# Altium schematic symbol library TitansLib.SchLib: 462 symbols (part 3 of 24)
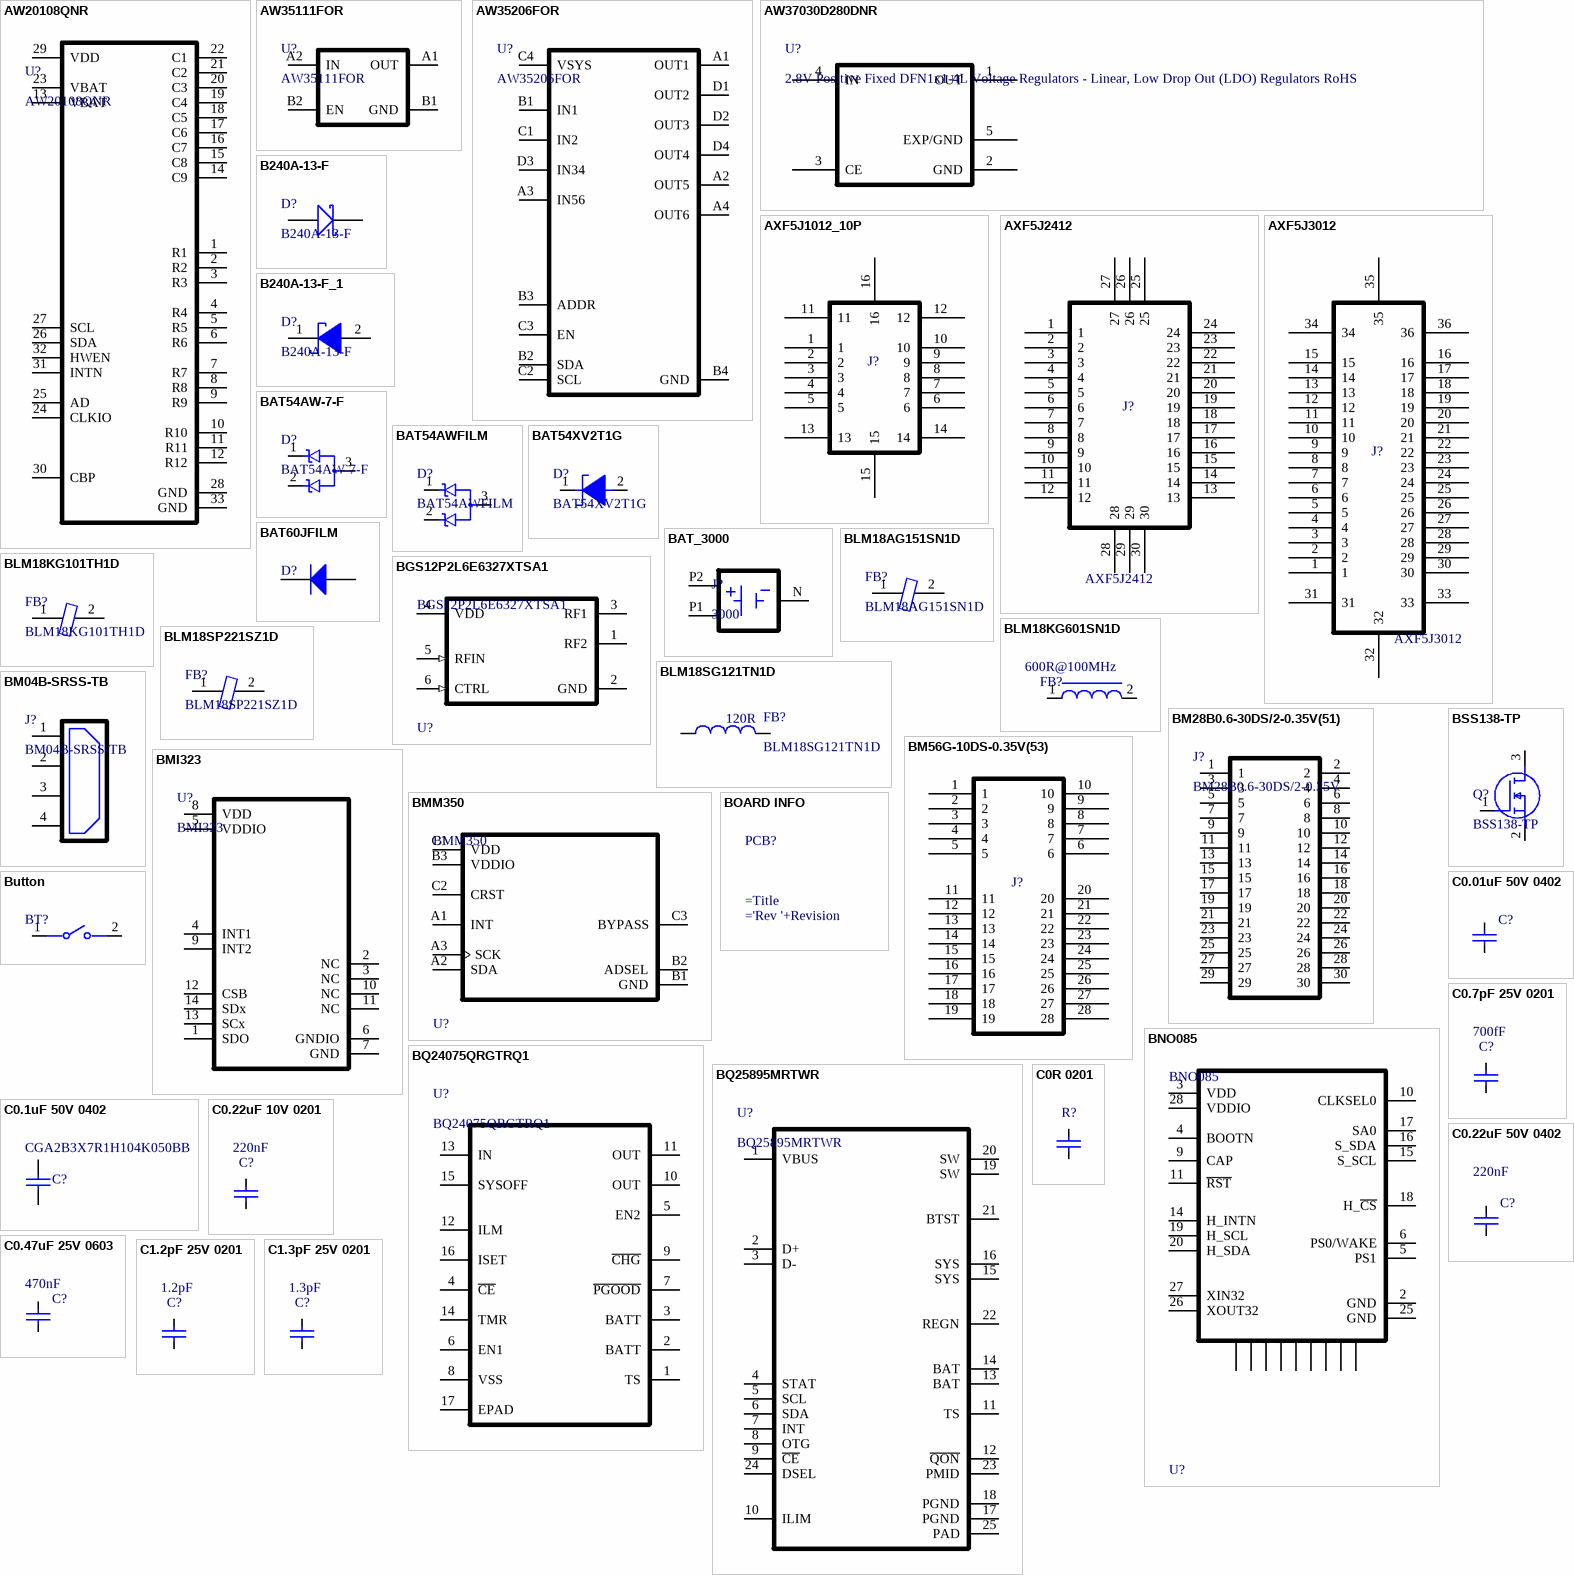
[diagram p19: symbols AW20108QNR to C1.3pF 25V 0201]

## BLM18KG101TH1D
designator FB?
100 Ohms @ 100 MHz Ferrite Bead 0805 3A RDC=0.03; Manufacturer 1: Murata; Suplier Unit Price 1: 0.1; Datashee: https://br.mouser.com/datasheet/3/76/2/QNFA9101.pdf; Manufacturer Part Number 1: BLM18KG101TH1D; Supplier Part Number 1: 81-BLM18KG101TH1D; Supplier Link 1: https://br.mouser.com/ProductDetail/Murata-Electronics/BLM18KG101TH1D?qs=DXqDLUyyb5Xf26t7%252Bt4UuQ%3D%3D; Supplier 1: Mouser
footprint BEADC1608X75N
pins: 1, 2

## BLM18KG601SN1D
designator FB?  Output Impedance: 600R@100MHz  (hidden comment: BLM18KG601SN1D)
Ferrite Chip, 1 Function(s), 1A, 2 Pin(s); Manufacturer: Murata; DC Resistance-Max: 150mR; Clock Frequency: 100MHz; Channels: 1; Current Rating: 1.3A; Supplier: Mouser; Supplier Part Number: 81-BLM18KG601SN1D; Manufacturer Part Number: BLM18KG601SN1D; RoHS: Yes; Category: Ferrite Beads and Chips; Stock: 469571; Pricing: 1=0.1, 10=0.062, 50=0.048, 100=0.043, 1000=0.027, 10000=0.019 (USD); Mounting Technology: Surface Mount; Material: Ferrite; Case Code: 0603; Terminal Finish: Tin; Min Operating Temperature: -55°C; Max Operating Temperature: 125°C; JESD-609 Code: e3; Construction: Chip Bead; Filter Type: FERRITE CHIP; Min Frequency: 100MHz; Packaging: Tape and Reel; Length: 1.6mm; Width: 0.8mm; Height: 0.8mm; Reach SVHC Compliant: Yes; RoHS Compliant: Yes; ComponentLink1URL: https://datasheet.ciiva.com:443/pdfs/VipMasterIC/IC/MURE/MURE-S-A0008515752/MURE-S-A0008515752-1.pdf?src-supplier=IHS+Markit; ComponentLink1Description: https://datasheet.ciiva.com:443/pdfs/VipMasterIC/IC/MURE/MURE-S-A0008515752/MURE-S-A0008515752-1.pdf?src-supplier=IHS+Markit; ComponentLink2URL: https://datasheet.ciiva.com/11795/0900766b81076276-11795743.pdf?src-supplier=Rs; ComponentLink2Description: https://datasheet.ciiva.com/11795/0900766b81076276-11795743.pdf?src-supplier=Rs; ComponentLink3URL: https://datasheet.ciiva.com/18183/getdatasheetpartid-226848-18183204.pdf?src-supplier=Verical; ComponentLink3Description: https://datasheet.ciiva.com/18183/getdatasheetpartid-226848-18183204.pdf?src-supplier=Verical; ComponentLink4URL: https://datasheet.ciiva.com/22715/486545-22715706.pdf?src-supplier=Element14; ComponentLink4Description: https://datasheet.ciiva.com/22715/486545-22715706.pdf?src-supplier=Element14; ComponentLink5URL: https://datasheet.ciiva.com/1012/l0110e-1012299.pdf?src-supplier=Digikey; ComponentLink5Description: https://datasheet.ciiva.com/1012/l0110e-1012299.pdf?src-supplier=Digikey; ComponentLink6URL: https://datasheet.ciiva.com/1012/l0110e-1012300.pdf?src-supplier=Digikey; ComponentLink6Description: https://datasheet.ciiva.com/1012/l0110e-1012300.pdf?src-supplier=Digikey; ComponentLink7URL: https://datasheet.ciiva.com/1012/l0110e-1012301.pdf?src-supplier=Digikey; ComponentLink7Description: https://datasheet.ciiva.com/1012/l0110e-1012301.pdf?src-supplier=Digikey; ComponentLink8URL: https://datasheet.ciiva.com/7649/486545-7649493.pdf?src-supplier=Element14; ComponentLink8Description: https://datasheet.ciiva.com/7649/486545-7649493.pdf?src-supplier=Element14
footprint BLM18-0_15-t0_8
pins: 1, 2

## BLM18SG121TN1D
designator FB?  value 120R
120 Ohms @ 100MHz 1 Power Line Ferrite Bead 0603 (1608 Metric) 3A 25mOhm; MF: Murata; DigiKey-Purchase-URL: https://snapeda.com/shop?store=DigiKey&id=270211; Availability: Good; Package: 1608 Murata; MP: BLM18SG121TN1D; Mouser-Purchase-URL: https://snapeda.com/shop?store=Mouser&id=270211; SnapEDA_Link: https://www.snapeda.com/parts/BLM18SG121TN1D/Murata/view-part/270211/?ref=snap; Price: None; Supplier 1: DigiKey; Supplier Part Number 1: 490-3996-1-ND; Supplier 2: DigiKey; Supplier Part Number 2: 490-3996-6-ND
footprint BEADC1608X65N
pins: 1, 2

## BLM18SP221SZ1D
designator FB?
220 Ohms @ 100 MHz Ferrite Bead 0603 2.8A RDC=0.048; Manufacturer 1: Murata; Suplier Unit Price 1: 0.25; Datashee: https://br.mouser.com/datasheet/3/76/2/QNFA9101.pdf; Manufacturer Part Number 1: BLM18SP221SZ1D; Supplier Part Number 1: 81-BLM18SP221SZ1D; Supplier Link 1: https://br.mouser.com/datasheet/3/76/2/QNFA9122.pdf; Supplier 1: Mouser
footprint BEADC1608X75N
footprint BLM18SP221SN1B
pins: 1, 2

## BM04B-SRSS-TB
designator J?
Connector Header Surface Mount 4 position 0.039" (1.00mm); Supplier 1: LCSC; Supplier Part Number 1: C495539
footprint BM04B-SRSS-TB (Connector Header Surface Mount 4 position 0.039" (1.00mm))
pins: 1, 2, 3, 4

## BM28B0.6-30DS/2-0.35V(51)
designator J?, comment BM28B0.6-30DS/2-0.35V
Conn Stacking RCP 30 POS 0.6mm Stack Height 0.35mm Solder ST SMD Emboss T/R; Manufacturer: HIROSE ELECTRIC; Manufacturer Part Number: BM28B0.6-30DS/2-0.35V(51); Connector Type: Receptacle; Contact Pitch: 350µm; Contact Resistance: 100mΩ; Contact Voltage Rating (AC): 30V; Current Rating: 300mA; Dielectric Material: Liquid Crystal Polymer; Insulation Resistance: 1GΩ; Number of Positions: 30; Plating Thickness: 1.27nm; Row Spacing: 1.57mm; Supplier: DigiKey; Supplier Part Number: 26-BM28B0.6-30DS/2-0.35V(51)CT-ND; RoHS: Compliant; Category: Card Edge Connectors; Stock: 19945; Pricing: 1=1.08, 10=0.915, 25=0.858, 50=0.817, 100=0.7779, 250=0.72916, 500=0.69432, 1000=0.66117, 2500=0.61978 (USD); Contact Gender: Female; Contact Plating: Gold; Contact Voltage Rating (DC): 30V; Height: 600µm; Housing Color: Black; Length: 7.85mm; Lifecycle Status: Production; Max Operating Temperature: 85°C; Min Operating Temperature: -40°C; Pins: 32; Number of Rows: 2; Orientation: Straight; Pitch: 350µm; REACH SVHC: Yes; Terminal Pitch: 350µm; Width: 1.7mm; ComponentLink1URL: https://datasheet.octopart.com:443/BM28B0.6-30DS-2-0.35V%2851%29-HIROSE-ELECTRIC-datasheet-180001069.pdf?src-supplier=IHS; ComponentLink1Description: https://datasheet.octopart.com:443/BM28B0.6-30DS-2-0.35V%2851%29-HIROSE-ELECTRIC-datasheet-180001069.pdf?src-supplier=IHS; ComponentLink2URL: https://datasheet.octopart.com:443/BM28B0.6-30DS-2-0.35V%2851%29-Hirose-datasheet-150019162.pdf?src-supplier=Sager+Electronics; ComponentLink2Description: https://datasheet.octopart.com:443/BM28B0.6-30DS-2-0.35V%2851%29-Hirose-datasheet-150019162.pdf?src-supplier=Sager+Electronics; ComponentLink3URL: https://sigma.octopart.com:443/145362499/technical_drawing/Hirose-BM28B0.6-30DS-2-0.35V%2851%29.pdf?src-supplier=Hirose+SCT; ComponentLink3Description: https://sigma.octopart.com:443/145362499/technical_drawing/Hirose-BM28B0.6-30DS-2-0.35V%2851%29.pdf?src-supplier=Hirose+SCT; ComponentLink4URL: https://datasheet.octopart.com:443/BM28B0.6-30DS-2-0.35V%2851%29-Hirose-datasheet-141193568.pdf?src-supplier=Hirose+SCT; ComponentLink4Description: https://datasheet.octopart.com:443/BM28B0.6-30DS-2-0.35V%2851%29-Hirose-datasheet-141193568.pdf?src-supplier=Hirose+SCT
footprint BM28B0.6-30DS/2-0.35V
pins: 1, 2, 3, 4, 5, 6, 7, 8, 9, 10, 11, 12, 13, 14, 15, 16, 17, 18, 19, 20, 21, 22, 23, 24, 25, 26, 27, 28, 29, 30

## BM56G-10DS-0.35V(53)
designator J?  (value not drawn)
Board to Board & Mezzanine Connectors Receptacle, 10pos., 0.35 pitch, 30V, 0.6mm height; Manufacturer: HIROSE ELECTRIC; Manufacturer Part Number: BM56G-10DS-0.35V(53); Supplier: DigiKey; Supplier Part Number: 26-BM56G-10DS-0.35V(53)DKR-ND; RoHS: Compliant; Category: Card Edge Connectors; Pricing: 1=2.01, 10=1.636, 25=1.508, 50=1.418, 100=1.3334, 250=1.22928, 500=1.15602 (USD); Export Control Classification Number (ECCN) Code: EAR99; Harmonized Tariff Schedule (HTS) Code: 8536.69.40.40; Introduction Date: 2022-06-14; Lifecycle Status: NRND; Pins: 10; Orientation: Vertical; REACH SVHC: Yes; ComponentLink1URL: https://datasheet.octopart.com:443/BM56G-10DS-0.35V%2853%29-HIROSE-ELECTRIC-datasheet-175646699.pdf?src-supplier=IHS; ComponentLink1Description: https://datasheet.octopart.com:443/BM56G-10DS-0.35V%2853%29-HIROSE-ELECTRIC-datasheet-175646699.pdf?src-supplier=IHS; ComponentLink2URL: https://datasheet.octopart.com:443/BM56G-10DS-0.35V%2853%29-Hirose-datasheet-170276191.pdf?src-supplier=Electro+Sonic; ComponentLink2Description: https://datasheet.octopart.com:443/BM56G-10DS-0.35V%2853%29-Hirose-datasheet-170276191.pdf?src-supplier=Electro+Sonic; ComponentLink3URL: https://datasheet.octopart.com:443/BM56G-10DS-0.35V%2853%29-HIROSE-ELECTRIC-datasheet-188748173.pdf?src-supplier=Master+Electronics; ComponentLink3Description: https://datasheet.octopart.com:443/BM56G-10DS-0.35V%2853%29-HIROSE-ELECTRIC-datasheet-188748173.pdf?src-supplier=Master+Electronics; ComponentLink4URL: https://datasheet.octopart.com:443/BM56G-10DS-0.35V%2853%29-HIROSE-ELECTRIC-datasheet-189197445.pdf?src-supplier=TME; ComponentLink4Description: https://datasheet.octopart.com:443/BM56G-10DS-0.35V%2853%29-HIROSE-ELECTRIC-datasheet-189197445.pdf?src-supplier=TME; ComponentLink5URL: https://datasheet.octopart.com:443/BM56G-10DS-0.35V%2853%29-Hirose-datasheet-170302514.pdf?src-supplier=Sager+Electronics; ComponentLink5Description: https://datasheet.octopart.com:443/BM56G-10DS-0.35V%2853%29-Hirose-datasheet-170302514.pdf?src-supplier=Sager+Electronics
pins: 1, 2, 3, 4, 5, 6, 7, 8, 9, 10, 11, 12, 13, 14, 15, 16, 17, 18, 19, 20, 21, 22, 23, 24, 25, 26, 27, 28

## BMI323
designator U?
Accelerometer/Gyroscope, 14 Pin; Manufacturer: Bosch Tools; Accuracy: 2%; Max Supply Voltage: 3.63V; Min Supply Voltage: 1.71V; Supplier: DigiKey; Supplier Part Number: 828-BMI323DKR-ND; Manufacturer Part Number: BMI323; RoHS: Compliant; Category: Sensors; Pricing: 1=3.27, 5=2.92, 10=2.79, 25=2.6348, 50=2.529, 100=2.4322, 500=2.23736, 1000=2.1726 (USD); Height: 700µm; Introduction Date: 2022-10-14; Length: 3mm; Lifecycle Status: Production; Max Operating Temperature: 85°C; Min Operating Temperature: -40°C; Mounting Technology: Surface Mount; Number of Terminals: 14; REACH SVHC: Yes; ComponentLink1URL: https://datasheet.octopart.com:443/BMI323-Bosch-Tools-datasheet-181206538.pdf?src-supplier=IHS; ComponentLink1Description: https://datasheet.octopart.com:443/BMI323-Bosch-Tools-datasheet-181206538.pdf?src-supplier=IHS; Supplier 1: DigiKey; Supplier Part Number 1: 828-BMI323DKR-ND; Supplier 2: DigiKey; Supplier Part Number 2: 828-BMI323TR-ND; Supplier 3: Mouser; Supplier Part Number 3: 262-BMI323
footprint LGA14C50P4X4_300X250X87 (LGA, 14-Leads, Body 3.00x2.50mmx0.87mm, Pitch 0.50mm)
pins: 1 SDO, 2 NC, 3 NC, 4 INT1, 5 VDDIO, 6 GNDIO, 7 GND, 8 VDD, 9 INT2, 10 NC, 11 NC, 12 CSB, 13 SCx, 14 SDx

## BMM350
designator U?
Dimensional Magnetoresistive Sensor 3 Axis 2mT Magnetic Field 9-Pin WLCSP; Manufacturer: Bosch Tools; Current Rating: 3.5mA; Max Supply Voltage: 1.98V; Min Supply Voltage: 1.72V; Supplier: DigiKey; Supplier Part Number: 828-BMM350CT-ND; Manufacturer Part Number: BMM350; RoHS: Compliant; Category: Linear ICs; Pricing: 1=1.98, 5=1.754, 10=1.672, 25=1.574, 50=1.5068, 100=1.4453, 500=1.32182, 1000=1.27586, 5000=1.224 (USD); Height: 306µm; Length: 1.28mm; Lifecycle Status: Production; Max Operating Temperature: 85°C; Min Operating Temperature: -40°C; Mounting Technology: Surface Mount; Number of Terminals: 9; REACH SVHC: Yes; ComponentLink1URL: https://datasheet.octopart.com:443/BMM350-Bosch-Tools-datasheet-168937789.pdf?src-supplier=IHS; ComponentLink1Description: https://datasheet.octopart.com:443/BMM350-Bosch-Tools-datasheet-168937789.pdf?src-supplier=IHS; Supplier 1: DigiKey; Supplier Part Number 1: 828-BMM350CT-ND; Supplier 2: DigiKey; Supplier Part Number 2: 828-BMM350TR-ND; Supplier 3: Mouser; Supplier Part Number 3: 262-BMM350
footprint BMM350
pins: A1 INT, A2 SDA, A3 SCK, B1 GND, B2 ADSEL, B3 VDDIO, C1 VDD, C2 CRST, C3 BYPASS

## BNO085
designator U?
IMU ACCEL/GYRO/MAG I2C 32BIT; Manufacturer: Hillcrest Laboratories, Inc.; Sensor Type: Accelerometer,Gyroscope,Magnetometer; Max Supply Voltage: 3.6V; Sensor Output: I2C,SPI,UART; Accel Range: 8g; Min Supply Voltage: 1.7V; Temperature Range High: +85°C; ComponentLink2URL: https://www.hillcrestlabs.com/download/5a747b8d566d073a5d000536; Octopart: https://octopart.com/bno085-hillcrest+laboratories-92813482; Height: 1.18mm; Device Class L1: Sensors; Digikey Description: IMU ACCEL/GYRO/MAG I2C 32BIT; Automotive: No; Package: BNO085; Device Class L3: Inertial Measurement Units (IMUs); Temperature: -40°C to +85°C; Category: IC; Device Class L2: Motion Sensors; Lead Free: Yes; Manufacturer Part Number: BNO085; Temperature Range Low: -40°C; RoHS: TRUE; ComponentLink2Description: Datasheet
footprint FP-BNO085-MFG
pins: 1 Reserved, 2 GND, 3 VDD, 4 BOOTN, 5 PS1, 6 PS0/WAKE, 7 Reserved, 8 Reserved, 9 CAP, 10 CLKSEL0, 11 ~{RST}, 12 Reserved, 13 Reserved, 14 H_INTN, 15 S_SCL, 16 S_SDA, 17 SA0, 18 H_~{CS}, 19 H_SCL, 20 H_SDA, 21 Reserved, 22 Reserved, 23 Reserved, 24 Reserved, 25 GND, 26 XOUT32, 27 XIN32, 28 VDDIO

## BOARD INFO
designator PCB?  (no BOM)
Not Assembled PCB Component; Project Name: =Title; Board Revision: ='Rev '+Revision
footprint PCB_Logo (Logo)
footprint PCB_Logo_Small (Logo)

## BQ24075QRGTRQ1
designator U?
Power Supply Support Circuit, Adjustable, 1 Channel, 6.6, PQCC16; Manufacturer: Texas Instruments; Package Body Material: Plastic; Adjustable Threshold: Yes; Number of Channels: 1; Package Equivalence Code: LCC16,.12SQ,20; Power Supplies: 4.5/6.3V; Supply Current-Max (Isup): 1.5mA; Max Supply Voltage: 26V; Min Supply Voltage: 4.35V; Nominal Supply Voltage: 5V; Qualification Status: Not Qualified; Supplier 1: Digikey; Supplier Part Number 1: 296-36557-2-ND; Supplier 2: Mouser; Supplier Part Number 2: 595-BQ24075QRGTRQ1; Supplier: Digikey; Supplier Part Number: 296-36557-2-ND; Manufacturer Part Number: BQ24075QRGTRQ1; RoHS: Yes; Category: Battery Management; Stock: 9000; Pricing: 3000=1.9325 (USD); Case/Package: HVQCCN; Pins: 16; Package Shape: Square; Terminal Finish: Nickel; Min Operating Temperature: -40°C; Max Operating Temperature: 125°C; JESD-609 Code: e4; Throw Configuration: POWER SUPPLY SUPPORT CIRCUIT; JESD-30 Code: S-PQCC-N16; Moisture Sensitivity Level: 3; Channels: 1; Package Style: CHIP CARRIER, HEAT SINK/SLUG, VERY THIN PROFILEMeter; Peak Reflow Temperature (Cel): 260°C; Surface Mount: Yes; Terminal Form: No Lead; Terminal Position: QUAD; Length: 3mm; Width: 3mm; Height - Seated (Max): 1mm; Terminal Pitch: 0.5mm; Temperature Grade: AUTOMOTIVE; Reach SVHC Compliant: Yes; RoHS Compliant: Yes; ComponentLink1URL: https://www.ti.com:443/lit/ds/symlink/bq24075-q1.pdf?src-supplier=IHS+Markit; ComponentLink1Description: https://www.ti.com:443/lit/ds/symlink/bq24075-q1.pdf?src-supplier=IHS+Markit; ComponentLink2URL: https://datasheet.ciiva.com/29609/bq24075-q1-29609824.pdf?src-supplier=Digikey; ComponentLink2Description: https://datasheet.ciiva.com/29609/bq24075-q1-29609824.pdf?src-supplier=Digikey; ComponentLink3URL: https://datasheet.ciiva.com/12237/slusau3b-128558-12237294.pdf?src-supplier=Mouser; ComponentLink3Description: https://datasheet.ciiva.com/12237/slusau3b-128558-12237294.pdf?src-supplier=Mouser
footprint BQ24075QRGTRQ1
pins: 1 TS, 2 BATT, 3 BATT, 4 ~{CE}, 5 EN2, 6 EN1, 7 ~{PGOOD}, 8 VSS, 9 ~{CHG}, 10 OUT, 11 OUT, 12 ILM, 13 IN, 14 TMR, 15 SYSOFF, 16 ISET, 17 EPAD

## BQ25895MRTWR
designator U?
Power Supply Support Circuit, Adjustable, 2 Channel, PQCC24; Manufacturer: Texas Instruments; Package Body Material: Plastic; Adjustable Threshold: Yes; Number of Channels: 2; Channels: 1; Max Supply Voltage: 14V; Min Supply Voltage: 3.9V; Supplier: Mouser; Supplier Part Number: 595-BQ25895MRTWR; Manufacturer Part Number: BQ25895MRTWR; RoHS: Yes; Category: Battery Management; Stock: 2485; Pricing: 1=3.53, 10=2.32, 50=2.15, 100=1.87, 1000=1.28, 10000=1.12 (USD); Case/Package: HVQCCN; Pins: 24; Package Shape: Square; Terminal Finish: Nickel; Min Operating Temperature: -40°C; Max Operating Temperature: 85°C; JESD-609 Code: e4; Throw Configuration: POWER SUPPLY SUPPORT CIRCUIT; Moisture Sensitivity Level: 2; Package Style: CHIP CARRIER, HEAT SINK/SLUG, VERY THIN PROFILEMeter; Peak Reflow Temperature (Cel): 260°C; Surface Mount: Yes; Terminal Form: No Lead; Terminal Position: QUAD; Length: 4mm; Width: 4mm; Height - Seated (Max): 0.8mm; Terminal Pitch: 0.5mm; Temperature Grade: INDUSTRIAL; Reach SVHC Compliant: Yes; RoHS Compliant: Yes; ComponentLink1URL: https://www.ti.com:443/lit/ds/symlink/bq25895m.pdf?src-supplier=IHS+Markit; ComponentLink1Description: https://www.ti.com:443/lit/ds/symlink/bq25895m.pdf?src-supplier=IHS+Markit; ComponentLink2URL: http://www.ti.com/general/docs/suppproductinfo.tsp?distId=10&amp;gotoUrl=http%3A%2F%2Fwww.ti.com%2Flit%2Fgpn%2Fbq25895m&src-supplier=Digikey; ComponentLink2Description: http://www.ti.com/general/docs/suppproductinfo.tsp?distId=10&amp;gotoUrl=http%3A%2F%2Fwww.ti.com%2Flit%2Fgpn%2Fbq25895m&src-supplier=Digikey; ComponentLink3URL: http://www.ti.com/lit/ds/symlink/bq25895m.pdf?src-supplier=Digikey; ComponentLink3Description: http://www.ti.com/lit/ds/symlink/bq25895m.pdf?src-supplier=Digikey; ComponentLink4URL: http://www.ti.com/general/docs/lit/getliterature.tsp?genericPartNumber=BQ25895M&&fileType=pdf&src-supplier=Avnet; ComponentLink4Description: http://www.ti.com/general/docs/lit/getliterature.tsp?genericPartNumber=BQ25895M&&fileType=pdf&src-supplier=Avnet
footprint BQ25895MRTWR
pins: 1 VBUS, 2 D+, 3 D-, 4 STAT, 5 SCL, 6 SDA, 7 INT, 8 OTG, 9 ~{CE}, 10 ILIM, 11 TS, 12 ~{QON}, 13 BAT, 14 BAT, 15 SYS, 16 SYS, 17 PGND, 18 PGND, 19 SW, 20 SW, 21 BTST, 22 REGN, 23 PMID, 24 DSEL, 25 PAD

## BSS138-TP
designator Q?
MOSFETs N-Ch Enh FET 50Vds 0.22A 20Vgs 0.35W; Manufacturer 1: MCC; Datasheet Link: https://www.mccsemi.com/pdf/Products/BSS138(SOT-23).pdf; Height: 1.25mm; Manufacturer Part Number 1: BSS138-TP; Supplier Part Number 1: 833-BSS138-TP; Supplier 1: Mouser; Supplier Unit Price 1: 0.18; Arrow Price/Stock: https://www.arrow.com/en/products/bss138-tp/micro-commercial-components?utm_currency=USD&region=europe
footprint SOT95P237X125-3N
pins: 1 G, 2 S, 3 D

## Button
designator BT?, comment Sun_But  (value not drawn)
Elastomer Button
footprint Sun_Button
pins: 1, 2

## C0.01uF 50V 0402
designator C?, comment CL05B103KB5VPJC  (value not drawn)
Multilayer Ceramic Capacitors MLCC - SMD/SMT 10nF+/-10% 50V X7R 1 0402; Manufacturer: Samsung Electro-Mechanics; Supplier: Mouser; Supplier Part Number: 187-CL05B103KB5VPJC; Manufacturer Part Number: CL05B103KB5VPJC; RoHS: Compliant; Category: Ceramic Capacitors; Stock: 363017; Supplier Unit Price 1: 0.1; Case/Package: 0402; Dielectric: X7R
footprint CAPC0402-M (Chip Capacitor, 2-Leads, Body 1.00x0.50mm, IPC Medium Density)
pins: 1, 2

## C0.1uF 50V 0402
designator C?, comment CGA2B3X7R1H104K050BB
C0.1uF 50V X7R 10% 0402; Manufacturer: TDK; Dielectric Material: Ceramic; Value: 100nF; Multilayer: Yes; Reference Standard: AEC-Q200; Supplier: Digikey; Supplier Part Number: 445-6899-1-ND; Manufacturer Part Number: CGA2B3X7R1H104K050BB; RoHS: Yes; Category: Ceramic Capacitors; Stock: 2155708; Pricing: 1=0.13, 10=0.075, 100=0.0451, 1000=0.02937, 2500=0.02541, 5000=0.02301 (USD); Mounting Technology: Surface Mount; Pins: 2; Package Shape: Rectangular; Case/Package: 0402; Terminal Finish: Nickel; Min Operating Temperature: -55°C; Max Operating Temperature: 125°C; JESD-609 Code: e3; Capacitor Type: Ceramic; Tolerance  (fill in as +-): 10%; Package Style: SMTMeter; Packaging: Tape and Reel; Tolerance (fill in as +-): 10%; Rated DC Voltage (URdc): 50V; Temperature Characteristics Code: X7R; Termination: Wraparound; Length: 1mm; Width: 0.5mm; Height: 0.5mm; Reach SVHC Compliant: Yes; RoHS Compliant: Yes; ComponentLink1URL: https://datasheet.ciiva.com:443/pdfs/VipMasterIC/IC/TDKC/TDKC-S-A0008953915/TDKC-S-A0008953915-1.pdf?src-supplier=IHS+Markit; ComponentLink1Description: https://datasheet.ciiva.com:443/pdfs/VipMasterIC/IC/TDKC/TDKC-S-A0008953915/TDKC-S-A0008953915-1.pdf?src-supplier=IHS+Markit; ComponentLink2URL: https://datasheet.ciiva.com/16498/mlccspec-automotive-general-midvoltage-en-16498528.pdf?src-supplier=Future+Electronics; ComponentLink2Description: https://datasheet.ciiva.com/16498/mlccspec-automotive-general-midvoltage-en-16498528.pdf?src-supplier=Future+Electronics; ComponentLink3URL: https://datasheet.ciiva.com/24216/cga2b3x7r1h104k050bb-266281-24216070.pdf?src-supplier=Mouser; ComponentLink3Description: https://datasheet.ciiva.com/24216/cga2b3x7r1h104k050bb-266281-24216070.pdf?src-supplier=Mouser; ComponentLink4URL: https://datasheet.ciiva.com/22725/1735392-22725627.pdf?src-supplier=Element14; ComponentLink4Description: https://datasheet.ciiva.com/22725/1735392-22725627.pdf?src-supplier=Element14; Supplier 1: DigiKey; Supplier Part Number 1: 445-6899-1-ND
footprint C0402_H0P7
pins: 1, 2

## C0.7pF 25V 0201
designator C?, comment value 700fF  (hidden comment: GJM0335C1ER70BB01D)
Multilayer Ceramic Capacitors MLCC - SMD/SMT 0201 0.7pF 25Volts C0G +/-0.1pF; Manufacturer: Murata; Manufacturer Lifecycle Status: IN PRODUCTION; Temperature Coefficient: 30ppm/°C; Voltage Rating: 25V; Supplier: DigiKey; Supplier Part Number: 490-8076-1-ND; Manufacturer Part Number: GJM0335C1ER70BB01D; RoHS: Compliant; Category: Ceramic Capacitors; Stock: 19303; Pricing: 1=0.1, 10=0.039, 50=0.0262, 100=0.0224, 500=0.0177, 1000=0.0142, 2500=0.01214, 5000=0.01091 (USD); Case/Package: 0201; Case Code (Imperial): 0201; Case Code (Metric): 0603; Depth: 300µm; Dielectric: C0G; Dielectric Material: Ceramic; Export Control Classification Number (ECCN) Code: EAR99; Height: 300µm; Harmonized Tariff Schedule (HTS) Code: 8532.24.00.20; Introduction Date: 2008-02-22; Lead Free: Lead Free; Length: 600µm; Lifecycle Status: Production; Material: Ceramic; Max Operating Temperature: 125°C; Min Operating Temperature: -55°C; Mounting Technology: Surface Mount; Number of Terminals: 2; Radiation Hardening: No; REACH SVHC: Yes; Schedule B: 8532240020, 8532240020|8532240020, 8532240020|8532240020|8532240020, 8532240020|8532240020|8532240020|8532240020; Termination: SMD/SMT; Thickness: 300µm; Voltage Rating (DC): 25V; Width: 300µm; ComponentLink1URL: https://datasheet.octopart.com:443/GJM0335C1ER70BB01D-Murata-datasheet-141270734.pdf?src-supplier=Geoflip; ComponentLink1Description: https://datasheet.octopart.com:443/GJM0335C1ER70BB01D-Murata-datasheet-141270734.pdf?src-supplier=Geoflip; ComponentLink2URL: https://datasheet.octopart.com:443/GJM0335C1ER70BB01D-Murata-datasheet-165579666.pdf?src-supplier=TME; ComponentLink2Description: https://datasheet.octopart.com:443/GJM0335C1ER70BB01D-Murata-datasheet-165579666.pdf?src-supplier=TME; ComponentLink3URL: https://datasheet.octopart.com:443/GJM0335C1ER70BB01D-Murata-datasheet-12511495.pdf?src-supplier=TME; ComponentLink3Description: https://datasheet.octopart.com:443/GJM0335C1ER70BB01D-Murata-datasheet-12511495.pdf?src-supplier=TME; ComponentLink4URL: https://datasheet.octopart.com:443/GJM0335C1ER70BB01D-Murata-datasheet-140664059.pdf?src-supplier=Ciiva; ComponentLink4Description: https://datasheet.octopart.com:443/GJM0335C1ER70BB01D-Murata-datasheet-140664059.pdf?src-supplier=Ciiva; ComponentLink5URL: https://datasheet.octopart.com:443/GJM0335C1ER70BB01D-Murata-datasheet-138722369.pdf?src-supplier=Ciiva; ComponentLink5Description: https://datasheet.octopart.com:443/GJM0335C1ER70BB01D-Murata-datasheet-138722369.pdf?src-supplier=Ciiva; ComponentLink6URL: https://datasheet.octopart.com:443/GJM0335C1ER70BB01D-Murata-datasheet-22122223.pdf?src-supplier=Future+Electronics; ComponentLink6Description: https://datasheet.octopart.com:443/GJM0335C1ER70BB01D-Murata-datasheet-22122223.pdf?src-supplier=Future+Electronics; ComponentLink7URL: https://datasheet.octopart.com:443/GJM0335C1ER70BB01D-Murata-datasheet-12510170.pdf?src-supplier=Future+Electronics; ComponentLink7Description: https://datasheet.octopart.com:443/GJM0335C1ER70BB01D-Murata-datasheet-12510170.pdf?src-supplier=Future+Electronics; ComponentLink8URL: https://datasheet.octopart.com:443/GJM0335C1ER70BB01D-Murata-datasheet-12539710.pdf?src-supplier=Future+Electronics; ComponentLink8Description: https://datasheet.octopart.com:443/GJM0335C1ER70BB01D-Murata-datasheet-12539710.pdf?src-supplier=Future+Electronics; ComponentLink9URL: https://datasheet.octopart.com:443/GJM0335C1ER70BB01D-Murata-datasheet-8517407.pdf?src-supplier=Future+Electronics; ComponentLink9Description: https://datasheet.octopart.com:443/GJM0335C1ER70BB01D-Murata-datasheet-8517407.pdf?src-supplier=Future+Electronics; ComponentLink10URL: https://datasheet.octopart.com:443/GJM0335C1ER70BB01D-Murata-datasheet-8387045.pdf?src-supplier=Future+Electronics; ComponentLink10Description: https://datasheet.octopart.com:443/GJM0335C1ER70BB01D-Murata-datasheet-8387045.pdf?src-supplier=Future+Electronics; ComponentLink11URL: https://datasheet.octopart.com:443/GJM0335C1ER70BB01D-Murata-datasheet-8324201.pdf?src-supplier=Future+Electronics; ComponentLink11Description: https://datasheet.octopart.com:443/GJM0335C1ER70BB01D-Murata-datasheet-8324201.pdf?src-supplier=Future+Electronics; ComponentLink12URL: https://datasheet.octopart.com:443/GJM0335C1ER70BB01D-Murata-datasheet-7628724.pdf?src-supplier=Future+Electronics; ComponentLink12Description: https://datasheet.octopart.com:443/GJM0335C1ER70BB01D-Murata-datasheet-7628724.pdf?src-supplier=Future+Electronics; ComponentLink13URL: https://datasheet.octopart.com:443/GJM0335C1ER70BB01D-Murata-datasheet-552801.pdf?src-supplier=Future+Electronics; ComponentLink13Description: https://datasheet.octopart.com:443/GJM0335C1ER70BB01D-Murata-datasheet-552801.pdf?src-supplier=Future+Electronics; ComponentLink14URL: https://datasheet.octopart.com:443/GJM0335C1ER70BB01D-Murata-datasheet-44781229.pdf?src-supplier=Future+Electronics; ComponentLink14Description: https://datasheet.octopart.com:443/GJM0335C1ER70BB01D-Murata-datasheet-44781229.pdf?src-supplier=Future+Electronics; ComponentLink15URL: https://datasheet.octopart.com/GJM0335C1ER70BB01D-Murata-datasheet-12515295.pdf; ComponentLink15Description: https://datasheet.octopart.com/GJM0335C1ER70BB01D-Murata-datasheet-12515295.pdf; ComponentLink16URL: https://datasheet.octopart.com/GJM0335C1ER70BB01D-Murata-datasheet-12510076.pdf; ComponentLink16Description: https://datasheet.octopart.com/GJM0335C1ER70BB01D-Murata-datasheet-12510076.pdf; ComponentLink17URL: https://datasheet.octopart.com/GJM0335C1ER70BB01D-Murata-datasheet-11978611.pdf; ComponentLink17Description: https://datasheet.octopart.com/GJM0335C1ER70BB01D-Murata-datasheet-11978611.pdf; ComponentLink18URL: https://datasheet.octopart.com/GJM0335C1ER70BB01D-Murata-datasheet-10025737.pdf; ComponentLink18Description: https://datasheet.octopart.com/GJM0335C1ER70BB01D-Murata-datasheet-10025737.pdf; ComponentLink19URL: https://datasheet.octopart.com/GJM0335C1ER70BB01D-Murata-datasheet-8819587.pdf; ComponentLink19Description: https://datasheet.octopart.com/GJM0335C1ER70BB01D-Murata-datasheet-8819587.pdf; ComponentLink20URL: https://datasheet.octopart.com/GJM0335C1ER70BB01D-Murata-datasheet-14405930.pdf; ComponentLink20Description: https://datasheet.octopart.com/GJM0335C1ER70BB01D-Murata-datasheet-14405930.pdf; ComponentLink21URL: http://sigma.octopart.com:80/reach_statement/Murata-company-16.pdf?src-supplier=Compliance+Statements; ComponentLink21Description: http://sigma.octopart.com:80/reach_statement/Murata-company-16.pdf?src-supplier=Compliance+Statements
footprint CAPC0603X03N (Chip Capacitor, 2-Leads, Body 0.60x0.30mm, IPC Medium Density)
pins: 1, 2

## C0.22uF 10V 0201
designator C?, comment value 220nF  (hidden comment: GRM033R61A224ME90D)
10V 220nF X5R ±20% 0201 Multilayer Ceramic Capacitors MLCC - SMD/SMT ROHS; Manufacturer: Murata; Manufacturer Lifecycle Status: IN PRODUCTION; Supplier: DigiKey; Supplier Part Number: 490-9984-1-ND; Manufacturer Part Number: GRM033R61A224ME90D; RoHS: Compliant; Category: Ceramic Capacitors; Stock: 2774037; Pricing: 1=0.1, 10=0.019, 50=0.0128, 100=0.0108, 500=0.00748, 1000=0.00649, 2500=0.00544, 5000=0.00481 (USD); Case/Package: 0201; Case Code (Imperial): 0201; Case Code (Metric): 0603; Country of Origin: Philippines; Depth: 300µm; Dielectric: X5R; Dielectric Material: Ceramic; Export Control Classification Number (ECCN) Code: EAR99; Height: 300µm; Harmonized Tariff Schedule (HTS) Code: 8532.24.00.20; Introduction Date: 2013-01-29; Lead Free: Lead Free; Length: 600µm; Lifecycle Status: Production; Material: Ceramic; Max Operating Temperature: 85°C; Min Operating Temperature: -55°C; Mounting Technology: Surface Mount; Number of Terminals: 2; Packaging: Tape & Reel (TR); REACH SVHC: Yes; Schedule B: 8532240020, 8532240020|8532240020, 8532240020|8532240020|8532240020, 8532240020|8532240020|8532240020|8532240020; Termination: SMD/SMT; Thickness: 300µm; Tolerance: 20%; Voltage: 10V; Voltage Rating: 10V; Voltage Rating (DC): 10V; Weight: 340.194278µg; Width: 300µm; ComponentLink1URL: https://datasheet.octopart.com:443/GRM033R61A224ME90D-Murata-datasheet-165579666.pdf?src-supplier=TME; ComponentLink1Description: https://datasheet.octopart.com:443/GRM033R61A224ME90D-Murata-datasheet-165579666.pdf?src-supplier=TME; ComponentLink2URL: https://datasheet.octopart.com:443/GRM033R61A224ME90D-Murata-datasheet-141274204.pdf?src-supplier=Ciiva; ComponentLink2Description: https://datasheet.octopart.com:443/GRM033R61A224ME90D-Murata-datasheet-141274204.pdf?src-supplier=Ciiva; ComponentLink3URL: https://datasheet.octopart.com:443/GRM033R61A224ME90D-Murata-datasheet-140676223.pdf?src-supplier=Ciiva; ComponentLink3Description: https://datasheet.octopart.com:443/GRM033R61A224ME90D-Murata-datasheet-140676223.pdf?src-supplier=Ciiva; ComponentLink4URL: https://datasheet.octopart.com:443/GRM033R61A224ME90D-Murata-datasheet-138738404.pdf?src-supplier=Ciiva; ComponentLink4Description: https://datasheet.octopart.com:443/GRM033R61A224ME90D-Murata-datasheet-138738404.pdf?src-supplier=Ciiva; ComponentLink5URL: https://datasheet.octopart.com:443/GRM033R61A224ME90D-Murata-datasheet-32479577.pdf?src-supplier=HQonline; ComponentLink5Description: https://datasheet.octopart.com:443/GRM033R61A224ME90D-Murata-datasheet-32479577.pdf?src-supplier=HQonline; ComponentLink6URL: https://datasheet.octopart.com:443/GRM033R61A224ME90D-Murata-datasheet-22122223.pdf?src-supplier=Future+Electronics; ComponentLink6Description: https://datasheet.octopart.com:443/GRM033R61A224ME90D-Murata-datasheet-22122223.pdf?src-supplier=Future+Electronics; ComponentLink7URL: https://datasheet.octopart.com/GRM033R61A224ME90D-Murata-datasheet-12515295.pdf; ComponentLink7Description: https://datasheet.octopart.com/GRM033R61A224ME90D-Murata-datasheet-12515295.pdf; ComponentLink8URL: https://datasheet.octopart.com/GRM033R61A224ME90D-Murata-datasheet-12510076.pdf; ComponentLink8Description: https://datasheet.octopart.com/GRM033R61A224ME90D-Murata-datasheet-12510076.pdf; ComponentLink9URL: https://datasheet.octopart.com/GRM033R61A224ME90D-Murata-datasheet-11978611.pdf; ComponentLink9Description: https://datasheet.octopart.com/GRM033R61A224ME90D-Murata-datasheet-11978611.pdf; ComponentLink10URL: https://datasheet.octopart.com/GRM033R61A224ME90D-Murata-datasheet-10025737.pdf; ComponentLink10Description: https://datasheet.octopart.com/GRM033R61A224ME90D-Murata-datasheet-10025737.pdf; ComponentLink11URL: https://datasheet.octopart.com/GRM033R61A224ME90D-Murata-datasheet-8819587.pdf; ComponentLink11Description: https://datasheet.octopart.com/GRM033R61A224ME90D-Murata-datasheet-8819587.pdf; ComponentLink12URL: https://datasheet.octopart.com/GRM033R61A224ME90D-Murata-datasheet-38882176.pdf; ComponentLink12Description: https://datasheet.octopart.com/GRM033R61A224ME90D-Murata-datasheet-38882176.pdf; ComponentLink13URL: http://sigma.octopart.com:80/reach_statement/Murata-company-16.pdf?src-supplier=Compliance+Statements; ComponentLink13Description: http://sigma.octopart.com:80/reach_statement/Murata-company-16.pdf?src-supplier=Compliance+Statements; Supplier 1: DigiKey; Supplier Part Number 1: 490-9984-1-ND; Supplier 2: DigiKey; Supplier Part Number 2: 490-9984-2-ND; Supplier 3: Mouser; Supplier Part Number 3: 81-GRM33R61A224ME90D
footprint CAPC0603X03N (Chip Capacitor, 2-Leads, Body 0.60x0.30mm, IPC Medium Density)
pins: 1, 2

## C0.22uF 50V 0402
designator C?, comment value 220nF  (hidden comment: GRM155R71C224KA12D)
0402 0.22 uF 16 V ±10% Tolerance X7R SMT Multilayer Ceramic Capacitor; Manufacturer: Murata; Manufacturer Lifecycle Status: IN PRODUCTION; Voltage: 16V; Supplier: DigiKey; Supplier Part Number: 490-5418-1-ND; Manufacturer Part Number: GRM155R71C224KA12D; RoHS: Compliant; Category: Ceramic Capacitors; Stock: 803787; Pricing: 1=0.08, 10=0.010, 50=0.0092, 100=0.0088 (USD); Case/Package: 0402; Case Code (Imperial): 0402; Case Code (Metric): 1005; Depth: 500µm; Dielectric: X7R; Dielectric Material: Ceramic; Height: 500µm; Lead Free: Lead Free; Length: 1mm; Lifecycle Status: Production; Material: Ceramic; Max Operating Temperature: 125°C; Min Operating Temperature: -55°C; Mounting Technology: Surface Mount; Pins: 2; Number of Terminals: 2; Packaging: Cut Tape; Radiation Hardening: No; REACH SVHC: Yes; Schedule B: 8532240020, 8532240020|8532240020, 8532240020|8532240020|8532240020, 8532240020|8532240020|8532240020|8532240020; Termination: SMD/SMT; Thickness: 500µm; Tolerance: 10%; Voltage Rating: 16V; Voltage Rating (DC): 16V; Width: 500µm; ComponentLink1URL: https://datasheet.octopart.com:443/GRM155R71C224KA12D-Murata-datasheet-39128485.pdf?src-supplier=Newark; ComponentLink1Description: https://datasheet.octopart.com:443/GRM155R71C224KA12D-Murata-datasheet-39128485.pdf?src-supplier=Newark; ComponentLink2URL: https://datasheet.octopart.com:443/GRM155R71C224KA12D-Murata-datasheet-62317120.pdf?src-supplier=element14+APAC; ComponentLink2Description: https://datasheet.octopart.com:443/GRM155R71C224KA12D-Murata-datasheet-62317120.pdf?src-supplier=element14+APAC; ComponentLink3URL: https://datasheet.octopart.com:443/GRM155R71C224KA12D-Murata-datasheet-142540683.pdf?src-supplier=Geoflip; ComponentLink3Description: https://datasheet.octopart.com:443/GRM155R71C224KA12D-Murata-datasheet-142540683.pdf?src-supplier=Geoflip; ComponentLink4URL: https://datasheet.octopart.com:443/GRM155R71C224KA12D-Murata-datasheet-12524644.pdf?src-supplier=_legacy+Avnet; ComponentLink4Description: https://datasheet.octopart.com:443/GRM155R71C224KA12D-Murata-datasheet-12524644.pdf?src-supplier=_legacy+Avnet; ComponentLink5URL: https://datasheet.octopart.com:443/GRM155R71C224KA12D-Murata-datasheet-165579666.pdf?src-supplier=TME; ComponentLink5Description: https://datasheet.octopart.com:443/GRM155R71C224KA12D-Murata-datasheet-165579666.pdf?src-supplier=TME; ComponentLink6URL: https://datasheet.octopart.com:443/GRM155R71C224KA12D-Murata-datasheet-81455579.pdf?src-supplier=TME; ComponentLink6Description: https://datasheet.octopart.com:443/GRM155R71C224KA12D-Murata-datasheet-81455579.pdf?src-supplier=TME; ComponentLink7URL: https://datasheet.octopart.com:443/GRM155R71C224KA12D-Murata-datasheet-141266224.pdf?src-supplier=Ciiva; ComponentLink7Description: https://datasheet.octopart.com:443/GRM155R71C224KA12D-Murata-datasheet-141266224.pdf?src-supplier=Ciiva; ComponentLink8URL: https://datasheet.octopart.com:443/GRM155R71C224KA12D-Murata-datasheet-140691306.pdf?src-supplier=Ciiva; ComponentLink8Description: https://datasheet.octopart.com:443/GRM155R71C224KA12D-Murata-datasheet-140691306.pdf?src-supplier=Ciiva; ComponentLink9URL: https://datasheet.octopart.com:443/GRM155R71C224KA12D-Murata-datasheet-138740906.pdf?src-supplier=Ciiva; ComponentLink9Description: https://datasheet.octopart.com:443/GRM155R71C224KA12D-Murata-datasheet-138740906.pdf?src-supplier=Ciiva; ComponentLink10URL: https://datasheet.octopart.com:443/GRM155R71C224KA12D-Murata-datasheet-22122223.pdf?src-supplier=Future+Electronics; ComponentLink10Description: https://datasheet.octopart.com:443/GRM155R71C224KA12D-Murata-datasheet-22122223.pdf?src-supplier=Future+Electronics; ComponentLink11URL: https://datasheet.octopart.com:443/GRM155R71C224KA12D-Murata-datasheet-14400575.pdf?src-supplier=Future+Electronics; ComponentLink11Description: https://datasheet.octopart.com:443/GRM155R71C224KA12D-Murata-datasheet-14400575.pdf?src-supplier=Future+Electronics; ComponentLink12URL: https://datasheet.octopart.com/GRM155R71C224KA12D-Murata-datasheet-12515295.pdf; ComponentLink12Description: https://datasheet.octopart.com/GRM155R71C224KA12D-Murata-datasheet-12515295.pdf; ComponentLink13URL: https://datasheet.octopart.com/GRM155R71C224KA12D-Murata-datasheet-12510076.pdf; ComponentLink13Description: https://datasheet.octopart.com/GRM155R71C224KA12D-Murata-datasheet-12510076.pdf; ComponentLink14URL: https://datasheet.octopart.com/GRM155R71C224KA12D-Murata-datasheet-11978611.pdf; ComponentLink14Description: https://datasheet.octopart.com/GRM155R71C224KA12D-Murata-datasheet-11978611.pdf; ComponentLink15URL: https://datasheet.octopart.com/GRM155R71C224KA12D-Murata-datasheet-10025737.pdf; ComponentLink15Description: https://datasheet.octopart.com/GRM155R71C224KA12D-Murata-datasheet-10025737.pdf; ComponentLink16URL: https://datasheet.octopart.com/GRM155R71C224KA12D-Murata-datasheet-8819587.pdf; ComponentLink16Description: https://datasheet.octopart.com/GRM155R71C224KA12D-Murata-datasheet-8819587.pdf; ComponentLink17URL: https://datasheet.octopart.com/GRM155R71C224KA12D-Murata-datasheet-14396904.pdf; ComponentLink17Description: https://datasheet.octopart.com/GRM155R71C224KA12D-Murata-datasheet-14396904.pdf; ComponentLink18URL: http://sigma.octopart.com:80/reach_statement/Murata-company-16.pdf?src-supplier=Compliance+Statements; ComponentLink18Description: http://sigma.octopart.com:80/reach_statement/Murata-company-16.pdf?src-supplier=Compliance+Statements; Supplier 1: DigiKey; Supplier Part Number 1: 490-5418-1-ND; Supplier 2: DigiKey; Supplier Part Number 2: 490-5418-2-ND; Supplier 3: Mouser; Supplier Part Number 3: 81-GRM155R71C224KA2D
footprint CAPC0402-M (Chip Capacitor, 2-Leads, Body 1.00x0.50mm, IPC Medium Density)
pins: 1, 2

## C0.47uF 25V 0603
designator C?, comment value 470nF  (hidden comment: CL10B105KA8NNNC)
Ceramic Capacitor, Multilayer, Ceramic, 25V, 10% +Tol, 10% -Tol, X7R, +-15% TC, 470nF, Surface Mount, 0603 inch; Manufacturer: Samsung Electro-Mechanics; Manufacturer Part Number: CL10B474KA8NFNC; Supplier: DigiKey; Supplier Part Number: 1276-2082-1-ND; RoHS: Compliant; Category: Ceramic Capacitors; Stock: 280097; Pricing: 1=0.1, 10=0.056, 50=0.0386, 100=0.0333, 500=0.02444, 1000=0.02172 (USD); Case/Package: 0603; Case Code (Imperial): 0603; Case Code (Metric): 1608; China RoHS: Compliant; Depth: 800µm; Dielectric: X7R; Dielectric Material: Ceramic; Height: 900µm; Lead Free: Lead Free; Length: 1.6002mm; Lifecycle Status: Production; Material: Ceramic; Max Operating Temperature: 125°C; Min Operating Temperature: -55°C; Mounting Technology: Surface Mount; Number of Terminals: 2; Radiation Hardening: No; REACH SVHC: Yes; Schedule B: 8532240020; Thickness: 889µm; Tolerance: 10%; Voltage Rating: 25V; Voltage Rating (DC): 25V; Width: 787.4µm; ComponentLink1URL: https://datasheet.octopart.com:443/CL10B474KA8NFNC-Samsung-Electro-Mechanics-datasheet-181551451.pdf?src-supplier=Newark; ComponentLink1Description: https://datasheet.octopart.com:443/CL10B474KA8NFNC-Samsung-Electro-Mechanics-datasheet-181551451.pdf?src-supplier=Newark; ComponentLink2URL: https://datasheet.octopart.com:443/CL10B474KA8NFNC-Samsung-Electro-Mechanics-datasheet-137894612.pdf?src-supplier=Samsung+SCT; ComponentLink2Description: https://datasheet.octopart.com:443/CL10B474KA8NFNC-Samsung-Electro-Mechanics-datasheet-137894612.pdf?src-supplier=Samsung+SCT; ComponentLink3URL: https://datasheet.octopart.com:443/CL10B474KA8NFNC-Samsung-Electro-Mechanics-datasheet-116051298.pdf?src-supplier=Future+Electronics; ComponentLink3Description: https://datasheet.octopart.com:443/CL10B474KA8NFNC-Samsung-Electro-Mechanics-datasheet-116051298.pdf?src-supplier=Future+Electronics; ComponentLink4URL: https://datasheet.octopart.com:443/CL10B474KA8NFNC-Samsung-Electro-Mechanics-datasheet-81461915.pdf?src-supplier=Future+Electronics; ComponentLink4Description: https://datasheet.octopart.com:443/CL10B474KA8NFNC-Samsung-Electro-Mechanics-datasheet-81461915.pdf?src-supplier=Future+Electronics; ComponentLink5URL: https://datasheet.octopart.com:443/CL10B474KA8NFNC-Samsung-datasheet-42770408.pdf?src-supplier=Future+Electronics; ComponentLink5Description: https://datasheet.octopart.com:443/CL10B474KA8NFNC-Samsung-datasheet-42770408.pdf?src-supplier=Future+Electronics; ComponentLink6URL: https://datasheet.octopart.com:443/CL10B474KA8NFNC-Samsung-datasheet-15238951.pdf?src-supplier=Future+Electronics; ComponentLink6Description: https://datasheet.octopart.com:443/CL10B474KA8NFNC-Samsung-datasheet-15238951.pdf?src-supplier=Future+Electronics; ComponentLink7URL: https://datasheet.octopart.com:443/CL10B474KA8NFNC-Samsung-datasheet-26669065.pdf?src-supplier=Future+Electronics; ComponentLink7Description: https://datasheet.octopart.com:443/CL10B474KA8NFNC-Samsung-datasheet-26669065.pdf?src-supplier=Future+Electronics; ComponentLink8URL: https://datasheet.octopart.com:443/CL10B474KA8NFNC-Samsung-Electro-Mechanics-datasheet-149136863.pdf?src-supplier=Future+Electronics; ComponentLink8Description: https://datasheet.octopart.com:443/CL10B474KA8NFNC-Samsung-Electro-Mechanics-datasheet-149136863.pdf?src-supplier=Future+Electronics; ComponentLink9URL: https://datasheet.octopart.com:443/CL10B474KA8NFNC-Samsung-datasheet-8326407.pdf?src-supplier=TME; ComponentLink9Description: https://datasheet.octopart.com:443/CL10B474KA8NFNC-Samsung-datasheet-8326407.pdf?src-supplier=TME; Supplier 1: DigiKey; Supplier Part Number 1: 1276-1184-1-ND; Supplier 2: DigiKey; Supplier Part Number 2: 1276-1184-2-ND; Supplier 3: Mouser; Supplier Part Number 3: 187-CL10B105KA8NNNC
footprint CAP0603-M (Chip Capacitor, 2-Leads, Body 1.60x0.80mm, IPC Medium Density)
pins: 1, 2

## C0R 0201
designator R?
GENERAL PURPOSE CHIP RESISTOR Metal Glaze/thick Film, 0.05W, 0ohm, Surface Mount, 0201
pins: 1, 2

## C1.2pF 25V 0201
designator C?, comment value 1.2pF  (hidden comment: GRM0335C1E1R2BA01D)
Multilayer Ceramic Capacitors MLCC - SMD/SMT 0201 1.2pF 25volts C0G +/-0.1pF; Manufacturer: Murata; Manufacturer Lifecycle Status: IN PRODUCTION; Temperature Coefficient: 30ppm/°C; Voltage Rating: 25V; Supplier: DigiKey; Supplier Part Number: 490-12676-1-ND; Manufacturer Part Number: GRM0335C1E1R2BA01D; RoHS: Compliant; Category: Ceramic Capacitors; Stock: 456763; Pricing: 1=0.1, 10=0.018, 50=0.0116, 100=0.0098, 500=0.0068, 1000=0.00587, 2500=0.00491, 5000=0.00433 (USD); Case/Package: 0201; Case Code (Imperial): 0201; Case Code (Metric): 0603; Dielectric Material: Ceramic; Export Control Classification Number (ECCN) Code: EAR99; Height: 300µm; Harmonized Tariff Schedule (HTS) Code: 8532.24.00.20; Introduction Date: 2013-05-17; Length: 600µm; Lifecycle Status: Production; Material: Ceramic; Max Operating Temperature: 125°C; Min Operating Temperature: -55°C; Mounting Technology: Surface Mount; Number of Terminals: 2; REACH SVHC: Yes; Schedule B: 8532240020, 8532240020|8532240020|8532240020|8532240020|8532240020; Termination: SMD/SMT; Thickness: 300µm; Voltage Rating (DC): 25V; Width: 300µm; ComponentLink1URL: https://datasheet.octopart.com:443/GRM0335C1E1R2BA01D-Murata-datasheet-165579666.pdf?src-supplier=TME; ComponentLink1Description: https://datasheet.octopart.com:443/GRM0335C1E1R2BA01D-Murata-datasheet-165579666.pdf?src-supplier=TME; ComponentLink2URL: https://datasheet.octopart.com:443/GRM0335C1E1R2BA01D-Murata-datasheet-141273936.pdf?src-supplier=Ciiva; ComponentLink2Description: https://datasheet.octopart.com:443/GRM0335C1E1R2BA01D-Murata-datasheet-141273936.pdf?src-supplier=Ciiva; ComponentLink3URL: https://datasheet.octopart.com:443/GRM0335C1E1R2BA01D-Murata-datasheet-140673908.pdf?src-supplier=Ciiva; ComponentLink3Description: https://datasheet.octopart.com:443/GRM0335C1E1R2BA01D-Murata-datasheet-140673908.pdf?src-supplier=Ciiva; ComponentLink4URL: https://datasheet.octopart.com:443/GRM0335C1E1R2BA01D-Murata-datasheet-138736688.pdf?src-supplier=Ciiva; ComponentLink4Description: https://datasheet.octopart.com:443/GRM0335C1E1R2BA01D-Murata-datasheet-138736688.pdf?src-supplier=Ciiva; ComponentLink5URL: https://datasheet.octopart.com/GRM0335C1E1R2BA01D-Murata-datasheet-12515295.pdf; ComponentLink5Description: https://datasheet.octopart.com/GRM0335C1E1R2BA01D-Murata-datasheet-12515295.pdf; ComponentLink6URL: https://datasheet.octopart.com/GRM0335C1E1R2BA01D-Murata-datasheet-12510076.pdf; ComponentLink6Description: https://datasheet.octopart.com/GRM0335C1E1R2BA01D-Murata-datasheet-12510076.pdf; ComponentLink7URL: https://datasheet.octopart.com/GRM0335C1E1R2BA01D-Murata-datasheet-11978611.pdf; ComponentLink7Description: https://datasheet.octopart.com/GRM0335C1E1R2BA01D-Murata-datasheet-11978611.pdf; ComponentLink8URL: https://datasheet.octopart.com/GRM0335C1E1R2BA01D-Murata-datasheet-10025737.pdf; ComponentLink8Description: https://datasheet.octopart.com/GRM0335C1E1R2BA01D-Murata-datasheet-10025737.pdf; ComponentLink9URL: https://datasheet.octopart.com/GRM0335C1E1R2BA01D-Murata-datasheet-8819587.pdf; ComponentLink9Description: https://datasheet.octopart.com/GRM0335C1E1R2BA01D-Murata-datasheet-8819587.pdf; ComponentLink10URL: https://datasheet.octopart.com/GRM0335C1E1R2BA01D-Murata-datasheet-14397975.pdf; ComponentLink10Description: https://datasheet.octopart.com/GRM0335C1E1R2BA01D-Murata-datasheet-14397975.pdf; ComponentLink11URL: http://sigma.octopart.com:80/reach_statement/Murata-company-16.pdf?src-supplier=Compliance+Statements; ComponentLink11Description: http://sigma.octopart.com:80/reach_statement/Murata-company-16.pdf?src-supplier=Compliance+Statements
footprint CAPC0603X03N (Chip Capacitor, 2-Leads, Body 0.60x0.30mm, IPC Medium Density)
pins: 1, 2

## C1.3pF 25V 0201
designator C?, comment value 1.3pF  (hidden comment: GJM0335C1E1R3BB01D)
Multilayer Ceramic Capacitors MLCC - SMD/SMT 0201 1.3pF 25Volts C0G +/-0.1pF; Manufacturer: Murata; Manufacturer Lifecycle Status: IN PRODUCTION; Temperature Coefficient: 30ppm/°C; Voltage Rating: 25V; Supplier: DigiKey; Supplier Part Number: 490-8069-1-ND; Manufacturer Part Number: GJM0335C1E1R3BB01D; RoHS: Compliant; Category: Ceramic Capacitors; Stock: 208433; Pricing: 1=0.1, 10=0.037, 50=0.025, 100=0.0214, 500=0.01536, 1000=0.01351, 2500=0.01156, 5000=0.0104 (USD); Case/Package: 0201; Case Code (Imperial): 0201; Case Code (Metric): 0603; Depth: 300µm; Dielectric: C0G; Dielectric Material: Ceramic; Export Control Classification Number (ECCN) Code: EAR99; Height: 300µm; Harmonized Tariff Schedule (HTS) Code: 8532.24.00.20; Introduction Date: 2008-02-22; Length: 600µm; Lifecycle Status: Production; Material: Ceramic; Max Operating Temperature: 125°C; Min Operating Temperature: -55°C; Mounting Technology: Surface Mount; Number of Terminals: 2; Radiation Hardening: No; REACH SVHC: Yes; Schedule B: 8532240020, 8532240020|8532240020, 8532240020|8532240020|8532240020, 8532240020|8532240020|8532240020|8532240020; Termination: SMD/SMT; Thickness: 300µm; Voltage Rating (DC): 25V; Width: 300µm; ComponentLink1URL: https://datasheet.octopart.com:443/GJM0335C1E1R3BB01D-Murata-datasheet-165579666.pdf?src-supplier=TME; ComponentLink1Description: https://datasheet.octopart.com:443/GJM0335C1E1R3BB01D-Murata-datasheet-165579666.pdf?src-supplier=TME; ComponentLink2URL: https://datasheet.octopart.com:443/GJM0335C1E1R3BB01D-Murata-datasheet-141270577.pdf?src-supplier=Ciiva; ComponentLink2Description: https://datasheet.octopart.com:443/GJM0335C1E1R3BB01D-Murata-datasheet-141270577.pdf?src-supplier=Ciiva; ComponentLink3URL: https://datasheet.octopart.com:443/GJM0335C1E1R3BB01D-Murata-datasheet-140663702.pdf?src-supplier=Ciiva; ComponentLink3Description: https://datasheet.octopart.com:443/GJM0335C1E1R3BB01D-Murata-datasheet-140663702.pdf?src-supplier=Ciiva; ComponentLink4URL: https://datasheet.octopart.com:443/GJM0335C1E1R3BB01D-Murata-datasheet-138721998.pdf?src-supplier=Ciiva; ComponentLink4Description: https://datasheet.octopart.com:443/GJM0335C1E1R3BB01D-Murata-datasheet-138721998.pdf?src-supplier=Ciiva; ComponentLink5URL: https://datasheet.octopart.com:443/GJM0335C1E1R3BB01D-Murata-datasheet-22122223.pdf?src-supplier=Future+Electronics; ComponentLink5Description: https://datasheet.octopart.com:443/GJM0335C1E1R3BB01D-Murata-datasheet-22122223.pdf?src-supplier=Future+Electronics; ComponentLink6URL: https://datasheet.octopart.com/GJM0335C1E1R3BB01D-Murata-datasheet-12515295.pdf; ComponentLink6Description: https://datasheet.octopart.com/GJM0335C1E1R3BB01D-Murata-datasheet-12515295.pdf; ComponentLink7URL: https://datasheet.octopart.com/GJM0335C1E1R3BB01D-Murata-datasheet-12510076.pdf; ComponentLink7Description: https://datasheet.octopart.com/GJM0335C1E1R3BB01D-Murata-datasheet-12510076.pdf; ComponentLink8URL: https://datasheet.octopart.com/GJM0335C1E1R3BB01D-Murata-datasheet-11978611.pdf; ComponentLink8Description: https://datasheet.octopart.com/GJM0335C1E1R3BB01D-Murata-datasheet-11978611.pdf; ComponentLink9URL: https://datasheet.octopart.com/GJM0335C1E1R3BB01D-Murata-datasheet-10025737.pdf; ComponentLink9Description: https://datasheet.octopart.com/GJM0335C1E1R3BB01D-Murata-datasheet-10025737.pdf; ComponentLink10URL: https://datasheet.octopart.com/GJM0335C1E1R3BB01D-Murata-datasheet-8819587.pdf; ComponentLink10Description: https://datasheet.octopart.com/GJM0335C1E1R3BB01D-Murata-datasheet-8819587.pdf; ComponentLink11URL: https://datasheet.octopart.com/GJM0335C1E1R3BB01D-Murata-datasheet-14405734.pdf; ComponentLink11Description: https://datasheet.octopart.com/GJM0335C1E1R3BB01D-Murata-datasheet-14405734.pdf; ComponentLink12URL: http://sigma.octopart.com:80/reach_statement/Murata-company-16.pdf?src-supplier=Compliance+Statements; ComponentLink12Description: http://sigma.octopart.com:80/reach_statement/Murata-company-16.pdf?src-supplier=Compliance+Statements
footprint CAPC0603X03N (Chip Capacitor, 2-Leads, Body 0.60x0.30mm, IPC Medium Density)
pins: 1, 2

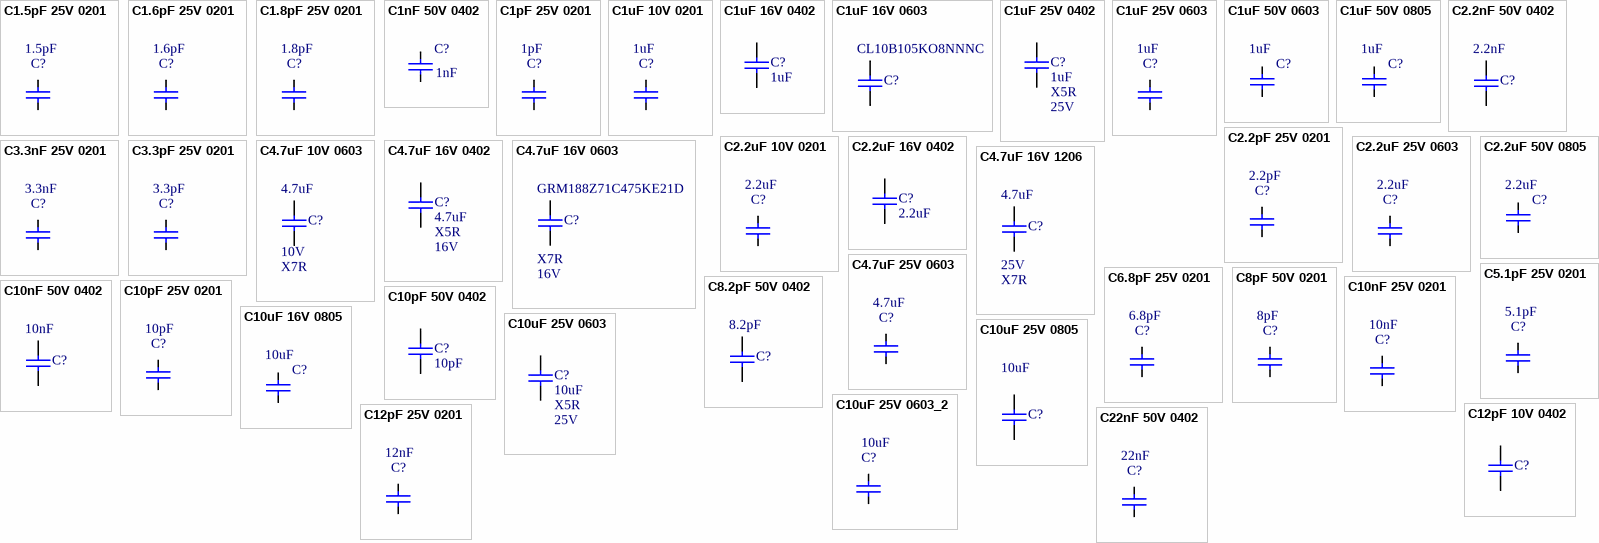
[diagram p2: symbols C1.5pF 25V 0201 to C22nF 50V 0402]